# Altium footprint library SamacSys.PcbLib: 1008 footprints (part 50 of 63)
Each footprint in its own frame and in the unit in brackets; x right, y up, seen from the top. Pads: shape width x height; smd on the part's side, far side on the other; paste and mask are expansions set on the pad; w line width, h text height; cw(c..) or ccw(c..) is an arc to the next point about the centre after c.
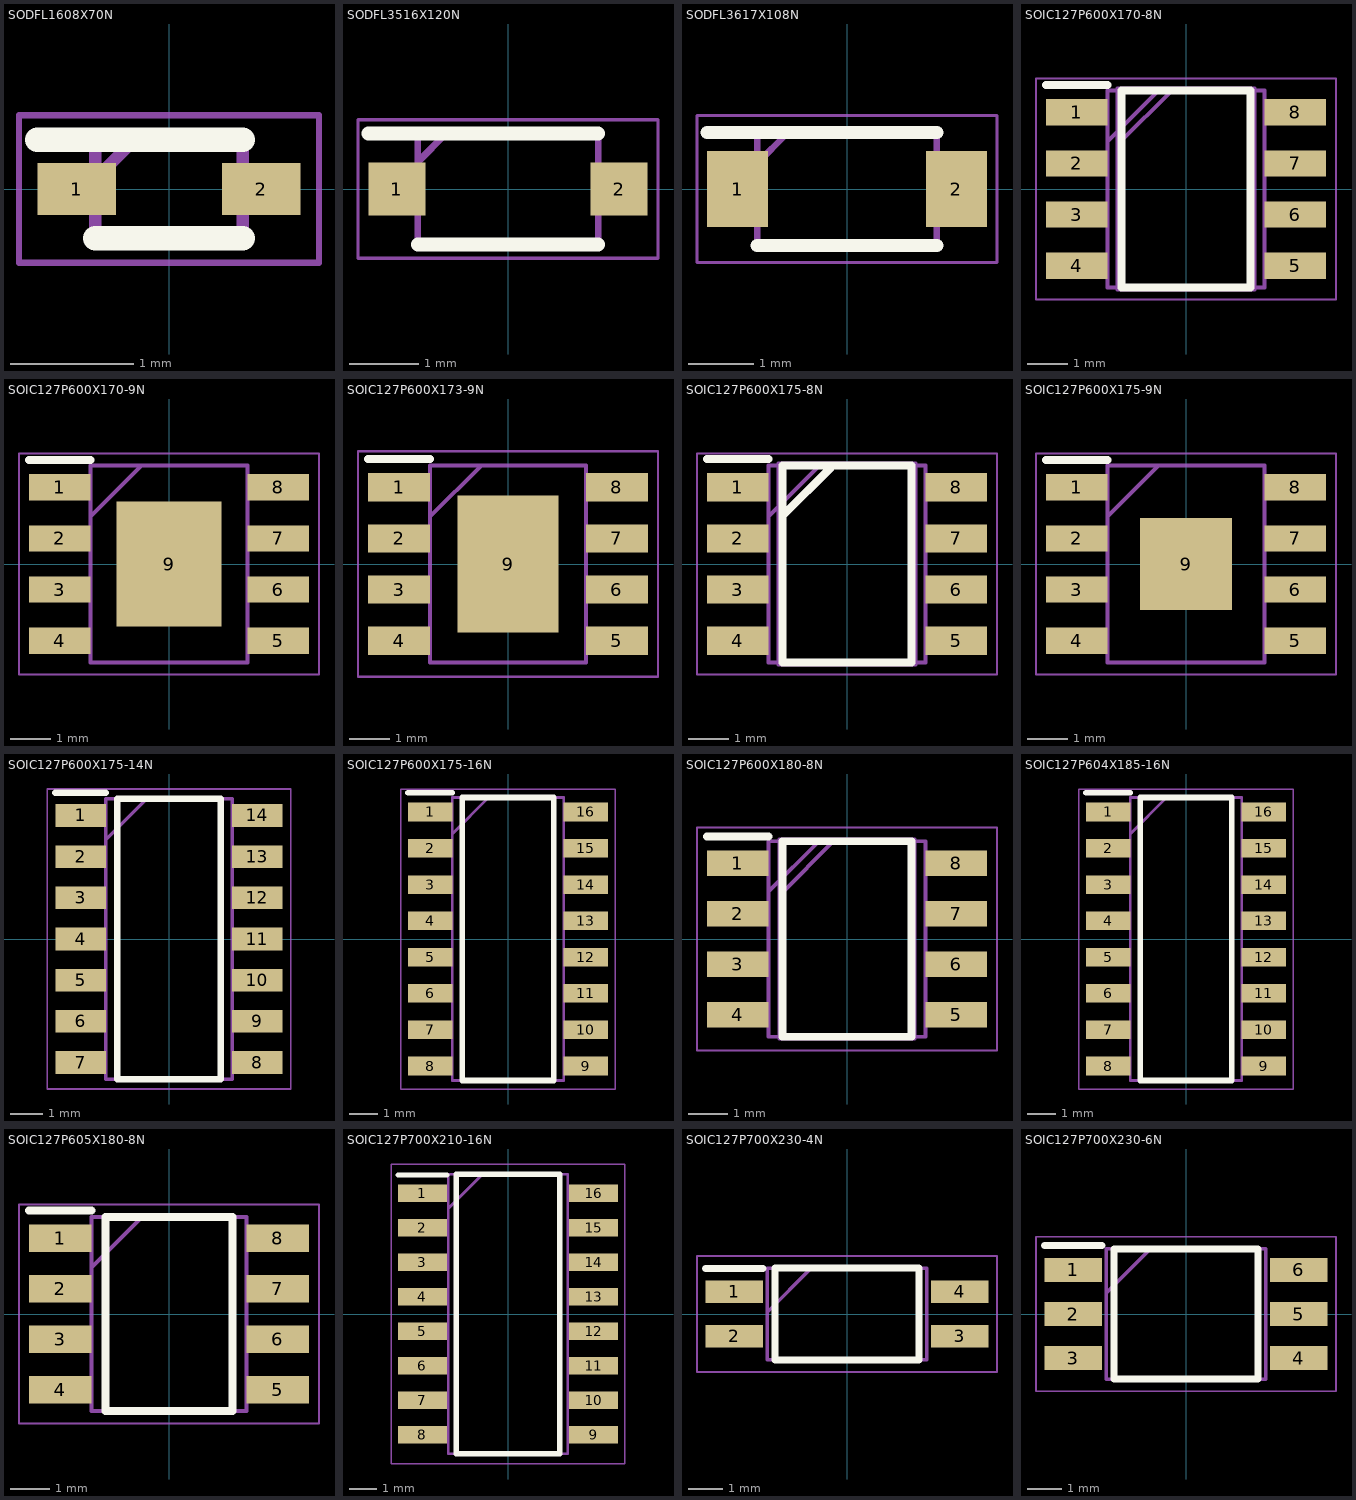
[diagram p49: the footprints below, top view; thin cyan lines are the x and y axes]

## SODFL1608X70N [mm]
pads (2):
  rect 0.64x0.42 smd: 1(-0.75,0) 2(0.75,0)
Top Overlay:
  lines w0.2: -1.07,0.4 0.6,0.4 ; -0.6,-0.4 0.6,-0.4
Assembly:
  lines w0.1: -0.6,0.08 -0.28,0.4 ; -0.6,-0.4 -0.6,0.4 0.6,0.4 0.6,-0.4 -0.6,-0.4
Countryard:
  lines w0.05: -1.22,-0.6 -1.22,0.6 1.22,0.6 1.22,-0.6 -1.22,-0.6
3D body "ESD5B5.0ST1G.stp": height 0.7, standoff 0, extent -0.8,-0.4 0.8,0.4

## SODFL3516X120N [mm]
pads (2):
  rect 0.82x0.76 smd: 1(-1.6,0) 2(1.6,0)
Top Overlay:
  lines w0.2: -2.01,0.8 1.3,0.8 ; -1.3,-0.8 1.3,-0.8
Assembly:
  lines w0.1: -1.3,0.39 -0.89,0.8 ; -1.3,-0.8 -1.3,0.8 1.3,0.8 1.3,-0.8 -1.3,-0.8
Countryard:
  lines w0.05: -2.16,-1 -2.16,1 2.16,1 2.16,-1 -2.16,-1
3D body "PMEG2010AEH.stp": height 1.1, standoff 0, extent -1.751,-0.805 1.749,0.795

## SODFL3617X108N [mm]
pads (2):
  rect 0.94x1.17 smd: 1(-1.675,0) 2(1.675,0)
Top Overlay:
  lines w0.2: -2.145,0.862 1.375,0.862 ; -1.375,-0.862 1.375,-0.862
Assembly:
  lines w0.1: -1.375,0.392 -0.905,0.862 ; -1.375,-0.862 -1.375,0.862 1.375,0.862 1.375,-0.862 -1.375,-0.862
Countryard:
  lines w0.05: -2.295,-1.125 -2.295,1.125 2.295,1.125 2.295,-1.125 -2.295,-1.125
3D body "S1BFL.stp": height 1.08, standoff 0, extent -1.8,-0.863 1.8,0.863

## SOIC127P600X170-8N [mm]
pads (8):
  rect 1.525x0.65 smd: 1(-2.712,1.905) 2(-2.712,0.635) 3(-2.712,-0.635) 4(-2.712,-1.905) 5(2.712,-1.905) 6(2.712,-0.635) 7(2.712,0.635) 8(2.712,1.905)
Top Overlay:
  lines w0.2: -3.475,2.58 -1.95,2.58 ; -1.6,-2.45 1.6,-2.45 1.6,2.45 -1.6,2.45 -1.6,-2.45
Top Assembly:
  lines w0.1: -1.7,1.1 -0.3,2.5 ; -1.7,-2.5 1.7,-2.5 1.7,2.5 -1.7,2.5 -1.7,-2.5
Assembly:
  lines w0.1: -1.95,1.18 -0.68,2.45 ; -1.95,-2.45 1.95,-2.45 1.95,2.45 -1.95,2.45 -1.95,-2.45
Countryard:
  lines w0.05: -3.725,-2.75 3.725,-2.75 3.725,2.75 -3.725,2.75 -3.725,-2.75
3D body "ST1S10PHR.stp": height 1.7, standoff 0, extent -3,-2.45 3,2.45

## SOIC127P600X170-9N [mm]
pads (9):
  rect 1.525x0.65 smd: 1(-2.712,1.905) 2(-2.712,0.635) 3(-2.712,-0.635) 4(-2.712,-1.905) 5(2.712,-1.905) 6(2.712,-0.635) 7(2.712,0.635) 8(2.712,1.905)
  rect 2.6x3.1 smd: 9(0,0)
Top Overlay:
  lines w0.2: -3.475,2.58 -1.95,2.58
Assembly:
  lines w0.1: -1.95,1.18 -0.68,2.45 ; -1.95,-2.45 1.95,-2.45 1.95,2.45 -1.95,2.45 -1.95,-2.45
Countryard:
  lines w0.05: -3.725,-2.75 3.725,-2.75 3.725,2.75 -3.725,2.75 -3.725,-2.75
3D body "LMR33630BDDA.stp": height 1.57, standoff 0, extent -3.014,-2.45 3.014,2.45

## SOIC127P600X173-9N [mm]
pads (9):
  rect 1.542x0.7 smd: 1(-2.704,1.905) 2(-2.704,0.635) 3(-2.704,-0.635) 4(-2.704,-1.905) 5(2.704,-1.905) 6(2.704,-0.635) 7(2.704,0.635) 8(2.704,1.905)
  rect 2.513x3.402 smd: 9(0,0)
Top Overlay:
  lines w0.2: -3.475,2.605 -1.934,2.605
Assembly:
  lines w0.1: -1.934,1.18 -0.664,2.45 ; -1.934,-2.45 1.934,-2.45 1.934,2.45 -1.934,2.45 -1.934,-2.45
Countryard:
  lines w0.05: -3.725,-2.8 3.725,-2.8 3.725,2.8 -3.725,2.8 -3.725,-2.8
3D body "ACT4529YH-T0011.stp": height 1.73, standoff 0, extent -3,-2.45 3,2.45

## SOIC127P600X175-8N [mm]
pads (8):
  rect 1.525x0.7 smd: 1(-2.712,1.905) 2(-2.712,0.635) 3(-2.712,-0.635) 4(-2.712,-1.905) 5(2.712,-1.905) 6(2.712,-0.635) 7(2.712,0.635) 8(2.712,1.905)
Top Overlay:
  lines w0.2: -3.475,2.605 -1.95,2.605 ; -1.6,1.2 -0.4,2.4 ; -1.6,-2.45 1.6,-2.45 1.6,2.45 -1.6,2.45 -1.6,-2.45
Top Assembly:
  lines w0.1: -1.7,1.1 -0.3,2.5 ; -1.7,-2.5 1.7,-2.5 1.7,2.5 -1.7,2.5 -1.7,-2.5
Assembly:
  lines w0.1: -1.95,1.18 -0.68,2.45 ; -1.95,-2.45 1.95,-2.45 1.95,2.45 -1.95,2.45 -1.95,-2.45
Countryard:
  lines w0.05: -3.725,-2.75 3.725,-2.75 3.725,2.75 -3.725,2.75 -3.725,-2.75
3D body "W25Q80DVSNIG.stp": height 1.75, standoff 0, extent -3,-2.45 3,2.45

## SOIC127P600X175-9N [mm]
pads (9):
  rect 1.525x0.65 smd: 1(-2.712,1.905) 2(-2.712,0.635) 3(-2.712,-0.635) 4(-2.712,-1.905) 5(2.712,-1.905) 6(2.712,-0.635) 7(2.712,0.635) 8(2.712,1.905)
  rect 2.29x2.29 smd: 9(0,0)
Top Overlay:
  lines w0.2: -3.475,2.58 -1.95,2.58
Assembly:
  lines w0.1: -1.95,1.18 -0.68,2.45 ; -1.95,-2.45 -1.95,2.45 1.95,2.45 1.95,-2.45 -1.95,-2.45
Countryard:
  lines w0.05: -3.725,-2.75 -3.725,2.75 3.725,2.75 3.725,-2.75 -3.725,-2.75
3D body "ADA4817-1ARDZ.stp": height 1.75, standoff 0, extent -3,-2.45 3,2.45

## SOIC127P600X175-14N [mm]
pads (14):
  rect 1.55x0.7 smd: 1(-2.725,3.81) 2(-2.725,2.54) 3(-2.725,1.27) 4(-2.725,0) 5(-2.725,-1.27) 6(-2.725,-2.54) 7(-2.725,-3.81) 8(2.725,-3.81) 9(2.725,-2.54) 10(2.725,-1.27) 11(2.725,0) 12(2.725,1.27) 13(2.725,2.54) 14(2.725,3.81)
Top Overlay:
  lines w0.2: -3.5,4.51 -1.95,4.51 ; -1.6,-4.325 -1.6,4.325 1.6,4.325 1.6,-4.325 -1.6,-4.325
Assembly:
  lines w0.1: -1.95,3.055 -0.68,4.325 ; -1.95,-4.325 -1.95,4.325 1.95,4.325 1.95,-4.325 -1.95,-4.325
Countryard:
  lines w0.05: -3.75,-4.625 -3.75,4.625 3.75,4.625 3.75,-4.625 -3.75,-4.625
3D body "74HC7014.stp": height 1.75, standoff 0, extent -3,-4.325 3,4.325

## SOIC127P600X175-16N [mm]
pads (16):
  rect 1.55x0.65 smd: 1(-2.725,4.445) 2(-2.725,3.175) 3(-2.725,1.905) 4(-2.725,0.635) 5(-2.725,-0.635) 6(-2.725,-1.905) 7(-2.725,-3.175) 8(-2.725,-4.445) 9(2.725,-4.445) 10(2.725,-3.175) 11(2.725,-1.905) 12(2.725,-0.635) 13(2.725,0.635) 14(2.725,1.905) 15(2.725,3.175) 16(2.725,4.445)
Top Overlay:
  lines w0.2: -3.5,5.12 -1.95,5.12 ; -1.6,-4.95 -1.6,4.95 1.6,4.95 1.6,-4.95 -1.6,-4.95
Assembly:
  lines w0.1: -1.95,3.68 -0.68,4.95 ; -1.95,-4.95 -1.95,4.95 1.95,4.95 1.95,-4.95 -1.95,-4.95
Countryard:
  lines w0.05: -3.75,-5.25 -3.75,5.25 3.75,5.25 3.75,-5.25 -3.75,-5.25
3D body "ULN2003ADR2G.stp": height 1.75, standoff 0, extent -3,-4.95 3,4.95

## SOIC127P600X180-8N [mm]
pads (8):
  rect 1.55x0.65 smd: 1(-2.75,1.905) 2(-2.75,0.635) 3(-2.75,-0.635) 4(-2.75,-1.905) 5(2.75,-1.905) 6(2.75,-0.635) 7(2.75,0.635) 8(2.75,1.905)
Top Overlay:
  lines w0.2: -3.525,2.58 -1.975,2.58 ; -1.625,-2.46 1.625,-2.46 1.625,2.46 -1.625,2.46 -1.625,-2.46
Top Assembly:
  lines w0.1: -1.7,1.1 -0.3,2.5 ; -1.7,-2.5 -1.7,2.5 1.7,2.5 1.7,-2.5 -1.7,-2.5
Assembly:
  lines w0.1: -1.975,1.19 -0.705,2.46 ; -1.975,-2.46 1.975,-2.46 1.975,2.46 -1.975,2.46 -1.975,-2.46
Countryard:
  lines w0.05: -3.775,-2.81 3.775,-2.81 3.775,2.81 -3.775,2.81 -3.775,-2.81

## SOIC127P604X185-16N [mm]
pads (16):
  rect 1.55x0.65 smd: 1(-2.725,4.445) 2(-2.725,3.175) 3(-2.725,1.905) 4(-2.725,0.635) 5(-2.725,-0.635) 6(-2.725,-1.905) 7(-2.725,-3.175) 8(-2.725,-4.445) 9(2.725,-4.445) 10(2.725,-3.175) 11(2.725,-1.905) 12(2.725,-0.635) 13(2.725,0.635) 14(2.725,1.905) 15(2.725,3.175) 16(2.725,4.445)
Top Overlay:
  lines w0.2: -3.5,5.12 -1.95,5.12 ; -1.6,-4.95 1.6,-4.95 1.6,4.95 -1.6,4.95 -1.6,-4.95
Assembly:
  lines w0.1: -1.95,3.68 -0.68,4.95 ; -1.95,-4.95 1.95,-4.95 1.95,4.95 -1.95,4.95 -1.95,-4.95
Countryard:
  lines w0.05: -3.75,-5.25 3.75,-5.25 3.75,5.25 -3.75,5.25 -3.75,-5.25
3D body "SL2.1A.stp": height 1.85, standoff 0, extent -3.02,-4.95 3.02,4.95

## SOIC127P605X180-8N [mm]
pads (8):
  rect 1.575x0.7 smd: 1(-2.738,1.905) 2(-2.738,0.635) 3(-2.738,-0.635) 4(-2.738,-1.905) 5(2.738,-1.905) 6(2.738,-0.635) 7(2.738,0.635) 8(2.738,1.905)
Top Overlay:
  lines w0.2: -3.525,2.605 -1.95,2.605 ; -1.6,-2.445 -1.6,2.445 1.6,2.445 1.6,-2.445 -1.6,-2.445
Assembly:
  lines w0.1: -1.95,1.175 -0.68,2.445 ; -1.95,-2.445 -1.95,2.445 1.95,2.445 1.95,-2.445 -1.95,-2.445
Countryard:
  lines w0.05: -3.775,-2.75 -3.775,2.75 3.775,2.75 3.775,-2.75 -3.775,-2.75
3D body "TP2272-SR.stp": height 1.8, standoff 0, extent -3.025,-2.445 3.025,2.445

## SOIC127P700X210-16N [mm]
pads (16):
  rect 1.8x0.65 smd: 1(-3.15,4.445) 2(-3.15,3.175) 3(-3.15,1.905) 4(-3.15,0.635) 5(-3.15,-0.635) 6(-3.15,-1.905) 7(-3.15,-3.175) 8(-3.15,-4.445) 9(3.15,-4.445) 10(3.15,-3.175) 11(3.15,-1.905) 12(3.15,-0.635) 13(3.15,0.635) 14(3.15,1.905) 15(3.15,3.175) 16(3.15,4.445)
Top Overlay:
  lines w0.2: -4.05,5.12 -2.25,5.12 ; -1.9,-5.15 -1.9,5.15 1.9,5.15 1.9,-5.15 -1.9,-5.15
Assembly:
  lines w0.1: -2.2,3.88 -0.93,5.15 ; -2.2,-5.15 -2.2,5.15 2.2,5.15 2.2,-5.15 -2.2,-5.15
Countryard:
  lines w0.05: -4.3,-5.525 -4.3,5.525 4.3,5.525 4.3,-5.525 -4.3,-5.525
3D body "TLP281-4_GB_.stp": height 1.91, standoff 0, extent -3.696,-5.27 3.696,5.27

## SOIC127P700X230-4N [mm]
pads (4):
  rect 1.65x0.65 smd: 1(-3.25,0.635) 2(-3.25,-0.635) 3(3.25,-0.635) 4(3.25,0.635)
Top Overlay:
  lines w0.2: -4.075,1.31 -2.425,1.31 ; -2.075,-1.325 2.075,-1.325 2.075,1.325 -2.075,1.325 -2.075,-1.325
Assembly:
  lines w0.1: -2.3,0.055 -1.03,1.325 ; -2.3,-1.325 2.3,-1.325 2.3,1.325 -2.3,1.325 -2.3,-1.325
Countryard:
  lines w0.05: -4.325,-1.675 4.325,-1.675 4.325,1.675 -4.325,1.675 -4.325,-1.675
3D body "TLP290_GB,SE_T.stp": height 2.2, standoff 0, extent -3.5,-1.3 3.5,1.3

## SOIC127P700X230-6N [mm]
pads (6):
  rect 1.65x0.7 smd: 1(-3.25,1.27) 2(-3.25,0) 3(-3.25,-1.27) 4(3.25,-1.27) 5(3.25,0) 6(3.25,1.27)
Top Overlay:
  lines w0.2: -4.075,1.97 -2.425,1.97 ; -2.075,-1.875 -2.075,1.875 2.075,1.875 2.075,-1.875 -2.075,-1.875
Assembly:
  lines w0.1: -2.3,0.605 -1.03,1.875 ; -2.3,-1.875 -2.3,1.875 2.3,1.875 2.3,-1.875 -2.3,-1.875
Countryard:
  lines w0.05: -4.325,-2.225 -4.325,2.225 4.325,2.225 4.325,-2.225 -4.325,-2.225
3D body "TLP185_GB,SE.stp": height 2.3, standoff 0, extent -3.5,-1.875 3.5,1.875